# Altium footprint library 2019-09-11_09-25-43.PcbLib: 1 footprints
Each footprint in its own frame and in the unit in brackets; x right, y up, seen from the top. Pads: shape width x height; smd on the part's side, far side on the other; paste and mask are expansions set on the pad; w line width, h text height; cw(c..) or ccw(c..) is an arc to the next point about the centre after c.
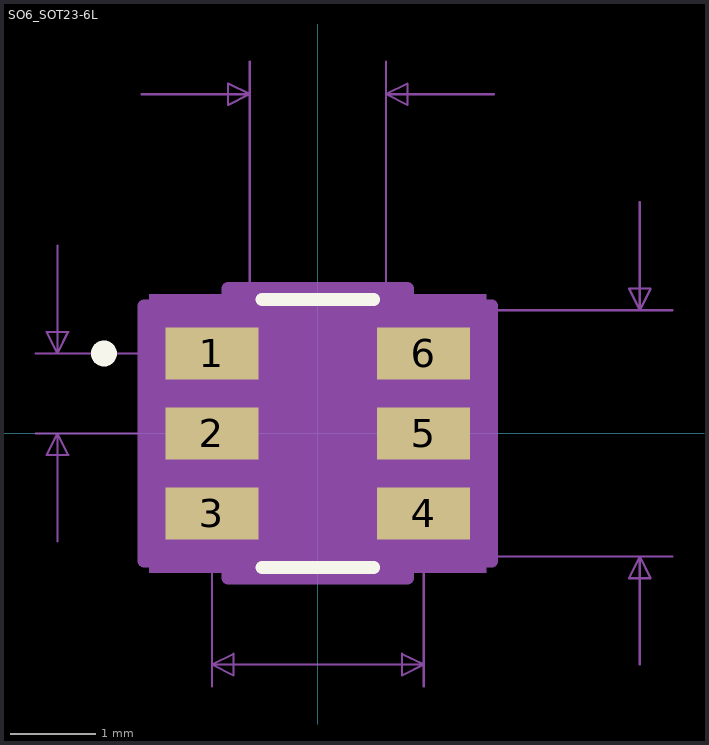
[diagram p0: the footprint, top view; thin cyan lines are the x and y axes]

## SO6_SOT23-6L [mil]
pads (6):
  rect 43x24 smd paste+0 mask+0: 1(-49,37) 2(-49,0) 3(-49,-37) 4(49,-37) 5(49,0) 6(49,37)
Top Overlay:
  circle w6: c-99,37 r3
  lines w6: -25.88,-62 25.88,-62 ; -25.88,62 25.88,62
Mechanical 5:
  region: 78,-64.5 -78,-64.5 -78,64.5 78,64.5
Mechanical 7:
  lines w1: -130.5,0 -49,0 ; -130.5,37 -49,37 ; -120.5,-50 -120.5,0 ; -120.5,87 -120.5,37 ; -81.5,157 -31.5,157 ; -49,-117 -49,-37 ; -31.5,57 -31.5,172 ; -1,-107 49,-107 ; 1,-107 -49,-107 ; 31.5,-57 164,-57 ; 31.5,172 31.5,57 164,57 ; 49,-117 49,-37 ; 81.5,157 31.5,157 ; 149,-107 149,-57 ; 149,107 149,57 ; -120.5,0 -115.5,-10 -125.5,-10 -120.5,0 ; -120.5,37 -115.5,47 -125.5,47 -120.5,37 ; -49,-107 -39,-112 -39,-102 -49,-107 ; -31.5,157 -41.5,162 -41.5,152 -31.5,157 ; 31.5,157 41.5,162 41.5,152 31.5,157 ; 49,-107 39,-112 39,-102 49,-107 ; 149,-57 144,-67 154,-67 149,-57 ; 149,57 144,67 154,67 149,57
  text "Default Padstyle: RX43Y24D0T" at -350,-257 h50
  text "Pin 1 Padstyle: RX43Y24D0T" at -325,-317 h50
  text "Alt 1 Padstyle: OX60Y90D30P" at -337.5,-497 h50
  text "Alt 2 Padstyle: OX90Y60D30P" at -337.5,-557 h50
  text ".037in/.94mm" at -280.5,6 h25
  text ".098in/2.489mm" at -87.5,-132 h25
  text "0.063in/1.6mm" at -81.25,177 h25
  text "0.114in/2.896mm" at 169,-12.5 h25
Mechanical 13:
  circle w0: c-21.5,37 r3
  lines w0: -12,57 ccw(c0,57) 12,57
  lines w1: -31.5,-57 31.5,-57 31.5,57 -31.5,57 -31.5,-57
Mechanical 15:
  region: -41.5,-59 -80.5,-59 -80.5,59 -41.5,59 -41.5,67 41.5,67 41.5,59 80.5,59 80.5,-59 41.5,-59 41.5,-67 -41.5,-67
  lines w6: -80.5,-59 -80.5,59 -41.5,59 -41.5,67 41.5,67 41.5,59 80.5,59 80.5,-59 41.5,-59 41.5,-67 -41.5,-67 -41.5,-59 -80.5,-59
3D body: height 10, standoff 0, extent 0,0 10,10